# Altium footprint library Zener_Diodes.PcbLib: 1 footprints
Each footprint in its own frame and in the unit in brackets; x right, y up, seen from the top. Pads: shape width x height; smd on the part's side, far side on the other; paste and mask are expansions set on the pad; w line width, h text height; cw(c..) or ccw(c..) is an arc to the next point about the centre after c.
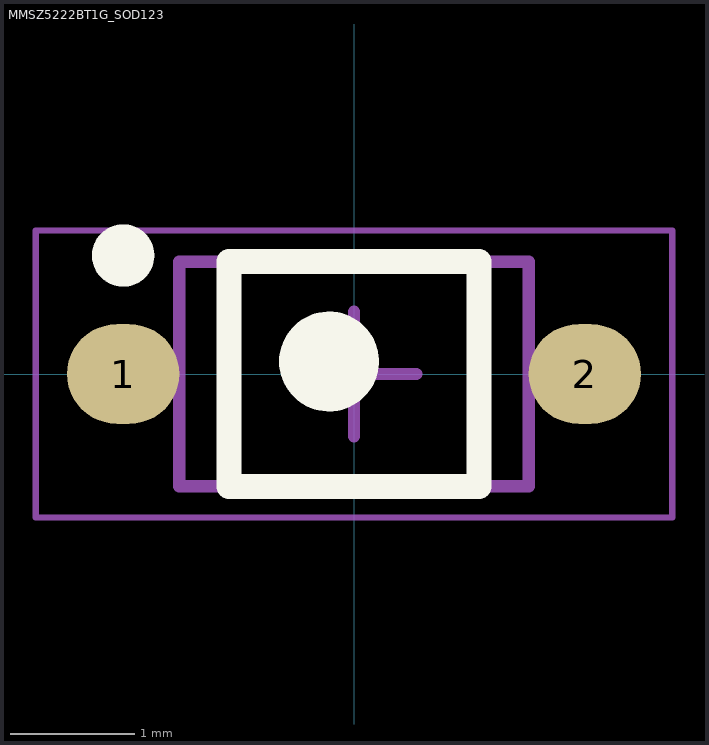
[diagram p0: the footprint, top view; thin cyan lines are the x and y axes]

## MMSZ5222BT1G_SOD123 [mm] "SOIC, 2-Leads, Body 1.60x2.69mm, Pitch 1.27mm, IPC Medium Density"
height 1.35
pads (2):
  oval 0.9x0.8 smd: 1(-1.85,0) 2(1.85,0)
Top Overlay:
  circle w0.4: c-0.2,0.1 r0.2
  circle w0.25: c-1.85,0.95 r0.125
  lines w0.2: -1,-0.9 1,-0.9 1,0.9 -1,0.9 -1,-0.9
Top Designator:
  text ".Designator" at -5.998,-0.4 h1.2
Mechanical 13:
  lines w0.1: -1.4,-0.9 1.4,-0.9 1.4,0.9 -1.4,0.9 -1.4,-0.9
Mechanical 15:
  lines w0.05: -2.55,-1.15 2.55,-1.15 2.55,1.15 -2.55,1.15 -2.55,-1.15
  lines w0.1: -0.5,0 0.5,0 ; 0,-0.5 0,0.5
3D body "SOIC127P370X135-2N.step": height 1.35, standoff 0, extent -1.855,-0.9 1.855,0.9